# Altium schematic symbol library IND,3.3uH,2.5A,70mR,CKNR4018Z-3R3MC,4x4mm.Schlib: 1 symbol
Pins are listed as number, name and electrical type; pins without a type are passive.

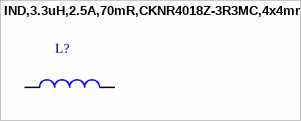
[diagram p0: symbol IND,3.3uH,2.5A,70mR,CKNR4018Z-3R3MC,4x4mm]

## IND,3.3uH,2.5A,70mR,CKNR4018Z-3R3MC,4x4mm
designator L?
pins: 1, 2